# Altium schematic symbol library C0603C223J4RACTU.SchLib: 1 symbol
Pins are listed as number, name and electrical type; pins without a type are passive.

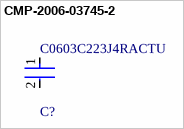
[diagram p0: symbol CMP-2006-03745-2]

## CMP-2006-03745-2
designator C?, comment C0603C223J4RACTU
CAP CER 0.022UF 16V 5% X7R 0603; Manufacturer: KEMET; Tolerance: 0.05; Automotive Grade: Grade 1; Temperature Coefficient: 30ppm/°C; Capacitance: 22,000 pF; Material: Ceramic; Value: 22,000 pF; ComponentLink2URL: https://api.kemet.com/component-edge/download/datasheet/C0603C100J5GACAUTO.pdf; Voltage Rating: 16 V; Digikey Description: CAP CER 0.022UF 16V 5% X7R 0603; Device Class L3: Ceramic Capacitors; Device Class L2: Capacitors; Lead Free: Yes; Automotive: Yes; Octopart: https://octopart.com/c0603c223j4ractu-kemet-12542861; Manufacturer Part Number: C0603C223J4RACTU; Temperature Range Low: -55°C; Mouser Description: Multilayer Ceramic Capacitors MLCC - SMD/SMT 16volts 22000pF X7R 5%; Temperature: -55°C to +125°C; RoHS: TRUE; Package: C0603C-CF; Device Class L1: Passive Components; ComponentLink2Description: Datasheet; Height: 0.87mm; Category: Cap; Temperature Range High: +125°C; Temperature Characteristic: X7R
footprint FP-C0603C-CF-IPC_B
footprint FP-C0603C-CF-MFG
footprint FP-C0603C-CF-IPC_A
footprint FP-C0603C-CF-IPC_C
pins: 1, 2